# Altium schematic symbol library MM32F3277G9P.SCHLIB: 73 symbols
Pins are listed as number, name and electrical type; pins without a type are passive.

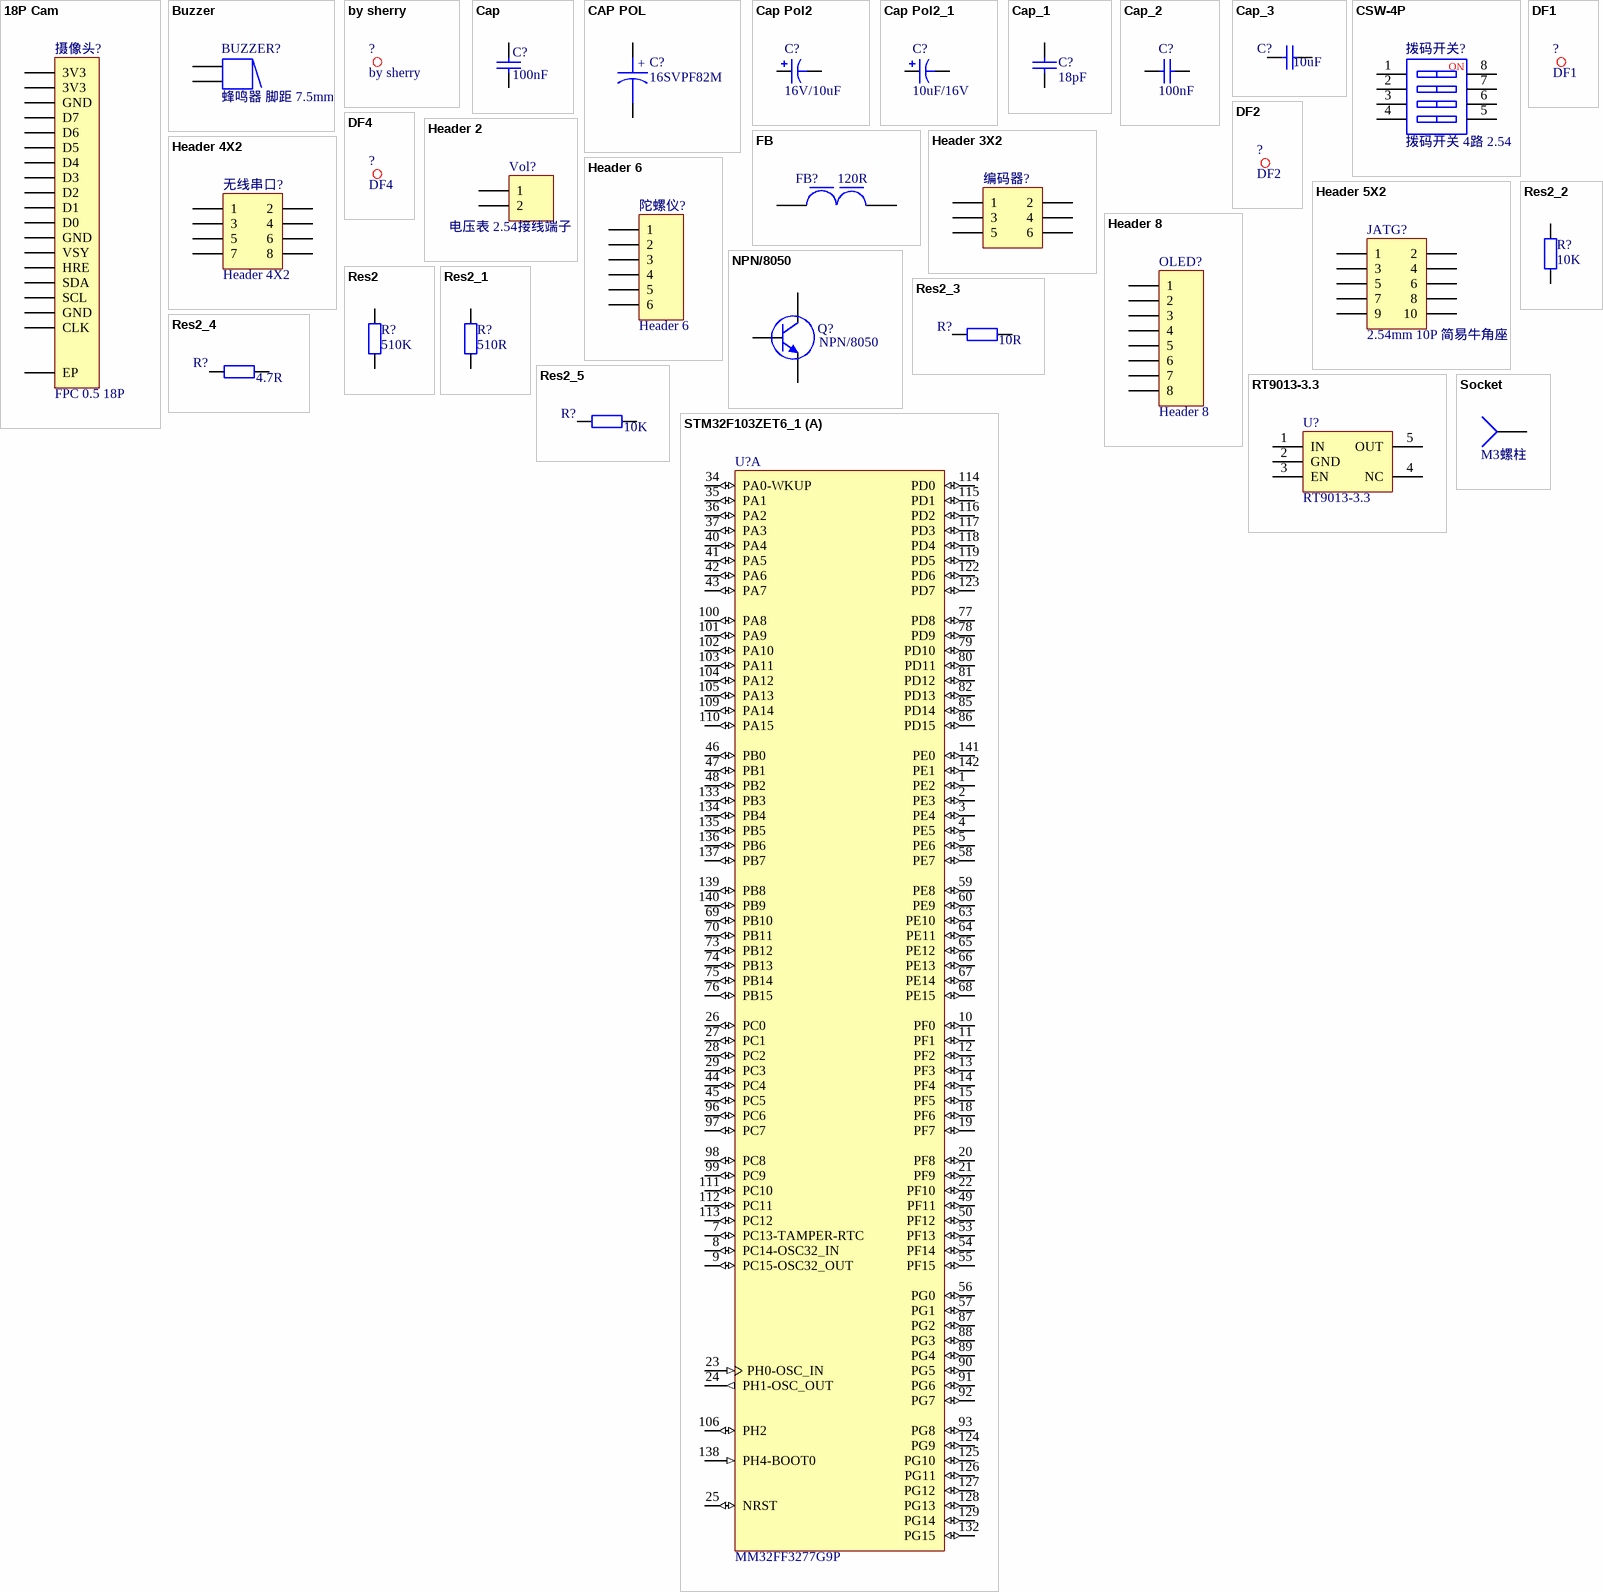
[diagram p0: symbols 18P Cam to STM32F103ZET6_1]

## 18P Cam
designator 摄像头?, comment FPC 0.5 18P
Header, 25-Pin; LatestRevisionDate: 17-Jul-2002; LatestRevisionNote: Re-released for DXP Platform.; Publisher: Altium Limited
signal-integrity model Connector
footprint FPC0.5 2H-WS-18P (长：13.2mm，宽：5.2mm，高：2mm)
pins: 0 EP, 1 3V3, 2 3V3, 3 GND, 4 D7, 5 D6, 6 D5, 7 D4, 8 D3, 9 D2, 10 D1, 11 D0, 12 GND, 13 VSY, 14 HRE, 15 SDA, 16 SCL, 17 GND, 18 CLK

## Buzzer
designator BUZZER?, comment 蜂鸣器 脚距 7.5mm
Magnetic Transducer Buzzer; Published: 24-Mar-1999; LatestRevisionDate: 17-Dec-2003; LatestRevisionNote: Schematic revised, PCB Footprint replaced.; DatasheetVersion: 17-Dec-2003; PackageReference: ABSM-1574; Publisher: Altium Limited; PackageDescription: Magnetic Transducer Buzzer; ComponentLink1Description: Manufacturer Link; ComponentLink1URL: http://www.megastar.com/linecard/buzzmode/index.php
footprint 7.5mm 蜂鸣器
footprint 蜂鸣器5.5mm脚距
pins: 1, 2
1 alternate drawing of the same symbol

## by sherry
designator ?
footprint IMPORTED_IMAGE

## Cap
designator C?, comment 100nF
Capacitor; Published: 8-Jun-2000; LatestRevisionDate: 17-Jul-2002; LatestRevisionNote: Re-released for DXP Platform.; PackageReference: RAD-0.3; Publisher: Altium Limited; PackageDescription: Radial Cap, Thru-Hole; 2 Leads; 0.3 in Pin Spacing
simulation model CAP (Capacitor)
signal-integrity model Cap
footprint 0603 电容 C3
pins: 1, 2

## CAP POL
designator C?, comment 16SVPF82M
Capacitor
footprint CT 8*7 - V (直径8mm，高7mm)
footprint CAP 5.0*12.5*20-H - GD (脚距5mm直径12.5mm高度20mm)
footprint CAP 3.5*8*11.5 - BK (脚距3.5mm直径8mm高度11.5mm)
footprint CAP 2.5*6.3*11.2 (脚距2.5mm直径6.3mm高度11.2mm)
pins: 1, 2
text: +

## Cap Pol2
designator C?, comment value 16V/10uF  (hidden comment: 10UF)
Polarized Capacitor (Axial); Published: 8-Jun-2000; LatestRevisionDate: 17-Jul-2002; LatestRevisionNote: Re-released for DXP Platform.; PackageReference: POLAR0.8; Publisher: Altium Limited; PackageDescription: Polarized Capacitor; 2 Leads
simulation model CAP (Capacitor)
signal-integrity model Cap Pol
footprint 0603 电容 C3
footprint C0805
pins: 1, 2
1 alternate drawing of the same symbol

## Cap Pol2_1
designator C?, comment 10UF  (value not drawn)
Polarized Capacitor (Axial); Published: 8-Jun-2000; LatestRevisionDate: 17-Jul-2002; LatestRevisionNote: Re-released for DXP Platform.; PackageReference: POLAR0.8; Publisher: Altium Limited; PackageDescription: Polarized Capacitor; 2 Leads
simulation model CAP (Capacitor)
signal-integrity model Cap Pol
footprint 0603 电容 C3
footprint C0805
pins: 1, 2
1 alternate drawing of the same symbol
text: 10uF/16V

## Cap_1
designator C?, comment 18pF
Capacitor; Published: 8-Jun-2000; LatestRevisionDate: 17-Jul-2002; LatestRevisionNote: Re-released for DXP Platform.; PackageReference: RAD-0.3; Publisher: Altium Limited; PackageDescription: Radial Cap, Thru-Hole; 2 Leads; 0.3 in Pin Spacing
simulation model CAP (Capacitor)
signal-integrity model Cap
footprint 0603 电容 C3
pins: 1, 2

## Cap_2
designator C?, comment 100nF
Capacitor; Published: 8-Jun-2000; LatestRevisionDate: 17-Jul-2002; LatestRevisionNote: Re-released for DXP Platform.; PackageReference: RAD-0.3; Publisher: Altium Limited; PackageDescription: Radial Cap, Thru-Hole; 2 Leads; 0.3 in Pin Spacing
simulation model CAP (Capacitor)
signal-integrity model Cap
footprint 0603 电容 C3
pins: 1, 2

## Cap_3
designator C?, comment 10UF
Capacitor; Published: 8-Jun-2000; LatestRevisionDate: 17-Jul-2002; LatestRevisionNote: Re-released for DXP Platform.; PackageReference: RAD-0.3; Publisher: Altium Limited; PackageDescription: Radial Cap, Thru-Hole; 2 Leads; 0.3 in Pin Spacing; Value: 10uF
simulation model CAP (Capacitor)
signal-integrity model Cap
footprint 0603 电容 C3
pins: 1, 2

## CSW-4P
designator 拨码开关?, comment 拨码开关 4路 2.54
4路编码开关; 版权归属: 源创客; BOM名称: 4路编码开关; 学习资源: www.ooocke.com
footprint CSW DIP-2P_G (6.6*9.9*7mm)
pins: 1, 2, 3, 4, 5, 6, 7, 8
text: NO

## DF1
designator ?
footprint DF1
footprint DF1

## DF2
designator ?
footprint DF2

## DF4
designator ?
footprint DF4小
footprint DF4大

## FB
designator FB?, comment 120R
footprint 0805 磁珠 FB3
pins: 1, 2

## Header 2
designator Vol?, comment 电压表 2.54接线端子
Header, 2-Pin; LatestRevisionDate: 17-Jul-2002; LatestRevisionNote: Re-released for DXP Platform.; Publisher: Altium Limited
signal-integrity model Connector
footprint XH2.54-LI-2P (接插件，2P)
pins: 1, 2

## Header 3X2
designator 编码器?  (value not drawn)
Header, 3-Pin, Dual row; LatestRevisionDate: 17-Jul-2002; LatestRevisionNote: Re-released for DXP Platform.; Publisher: Altium Limited
signal-integrity model Connector
footprint 2.54mm 6P 简易牛角座 (立式直插简牛插座，间距2.54（蒜米工坊）)
footprint DC-2.54-L-Z-6P (立式直插简牛插座，间距2.54（蒜米工坊）)
pins: 1, 2, 3, 4, 5, 6

## Header 4X2
designator 无线串口?
Header, 4-Pin, Dual row; LatestRevisionDate: 17-Jul-2002; LatestRevisionNote: Re-released for DXP Platform.; Publisher: Altium Limited
signal-integrity model Connector
footprint HDR2.54-LI-2x4P (双排排针，4x2脚)
pins: 1, 2, 3, 4, 5, 6, 7, 8

## Header 5X2
designator JATG?, comment 2.54mm 10P 简易牛角座
Header, 5-Pin, Dual row
footprint HDR2.54-LI-2x5P (双排排针，5x2脚 淘宝ID:黄晶宝石   店铺网址:https://shop463601444.taobao.com)
pins: 1, 2, 3, 4, 5, 6, 7, 8, 9, 10

## Header 6
designator 陀螺仪?
Header, 6-Pin; LatestRevisionDate: 17-Jul-2002; LatestRevisionNote: Re-released for DXP Platform.; Publisher: Altium Limited
signal-integrity model Connector
footprint MX 1.25-WS-6P (长：12.65mm，宽：4.2mm，高：3.4mm)
pins: 1, 2, 3, 4, 5, 6

## Header 8
designator OLED?
Header, 8-Pin; LatestRevisionDate: 17-Jul-2002; LatestRevisionNote: Re-released for DXP Platform.; Publisher: Altium Limited
signal-integrity model Connector
footprint HDR2.54-LI-8P (排针，8脚)
pins: 1, 2, 3, 4, 5, 6, 7, 8

## NPN/8050
designator Q?
footprint SOT232-3 三极管
footprint 蜂鸣器 (淘宝ID:黄晶宝石)
pins: 1 B, 2 E, 3 C

## Res2
designator R?, comment 510K
Resistor; Value: 1.5K; Published: 8-Jun-2000; LatestRevisionDate: 17-Jul-2002; LatestRevisionNote: Re-released for DXP Platform.; PackageReference: AXIAL-0.4; Publisher: Altium Limited; PackageDescription: Axial Device, Thru-Hole; 2 Leads; 0.4 in Pin Spacing
simulation model RESISTOR (Resistor)
signal-integrity model Res
footprint 0603 电阻 R3
pins: 1, 2

## Res2_1
designator R?, comment 510R
Resistor; Value: 1.5K; Published: 8-Jun-2000; LatestRevisionDate: 17-Jul-2002; LatestRevisionNote: Re-released for DXP Platform.; PackageReference: AXIAL-0.4; Publisher: Altium Limited; PackageDescription: Axial Device, Thru-Hole; 2 Leads; 0.4 in Pin Spacing
simulation model RESISTOR (Resistor)
signal-integrity model Res
footprint 0603 电阻 R3
pins: 1, 2

## Res2_2
designator R?, comment 10K
Resistor; Value: 1.5K; Published: 8-Jun-2000; LatestRevisionDate: 17-Jul-2002; LatestRevisionNote: Re-released for DXP Platform.; PackageReference: AXIAL-0.4; Publisher: Altium Limited; PackageDescription: Axial Device, Thru-Hole; 2 Leads; 0.4 in Pin Spacing
simulation model RESISTOR (Resistor)
signal-integrity model Res
footprint 0603 电阻 R3
pins: 1, 2

## Res2_3
designator R?, comment value 10R  (hidden comment: 4.7K)
Resistor; Published: 8-Jun-2000; LatestRevisionDate: 17-Jul-2002; LatestRevisionNote: Re-released for DXP Platform.; PackageReference: AXIAL-0.4; Publisher: Altium Limited; PackageDescription: Axial Device, Thru-Hole; 2 Leads; 0.4 in Pin Spacing
simulation model RESISTOR (Resistor)
signal-integrity model Res
footprint 0603 电阻 R3
pins: 1, 2

## Res2_4
designator R?, comment value 4.7R  (hidden comment: 4.7K)
Resistor; Published: 8-Jun-2000; LatestRevisionDate: 17-Jul-2002; LatestRevisionNote: Re-released for DXP Platform.; PackageReference: AXIAL-0.4; Publisher: Altium Limited; PackageDescription: Axial Device, Thru-Hole; 2 Leads; 0.4 in Pin Spacing
simulation model RESISTOR (Resistor)
signal-integrity model Res
footprint 0603 电阻 R3
pins: 1, 2

## Res2_5
designator R?, comment value 10K  (hidden comment: 4.7K)
Resistor; Published: 8-Jun-2000; LatestRevisionDate: 17-Jul-2002; LatestRevisionNote: Re-released for DXP Platform.; PackageReference: AXIAL-0.4; Publisher: Altium Limited; PackageDescription: Axial Device, Thru-Hole; 2 Leads; 0.4 in Pin Spacing
simulation model RESISTOR (Resistor)
signal-integrity model Res
footprint 0603 电阻 R3
pins: 1, 2

## RT9013-3.3
designator U?
3.3V电源芯片
footprint SOT23-5N (3x1.6x1.1mm(长宽高))
pins: 1 IN, 2 GND, 3 EN, 4 NC, 5 OUT

## Socket
designator J?, comment M3螺柱
Socket; LatestRevisionDate: 17-Jul-2002; LatestRevisionNote: Re-released for DXP Platform.; Publisher: Altium Limited
signal-integrity model Connector
footprint MTGP720H320V6P - duplicate
pins: 1

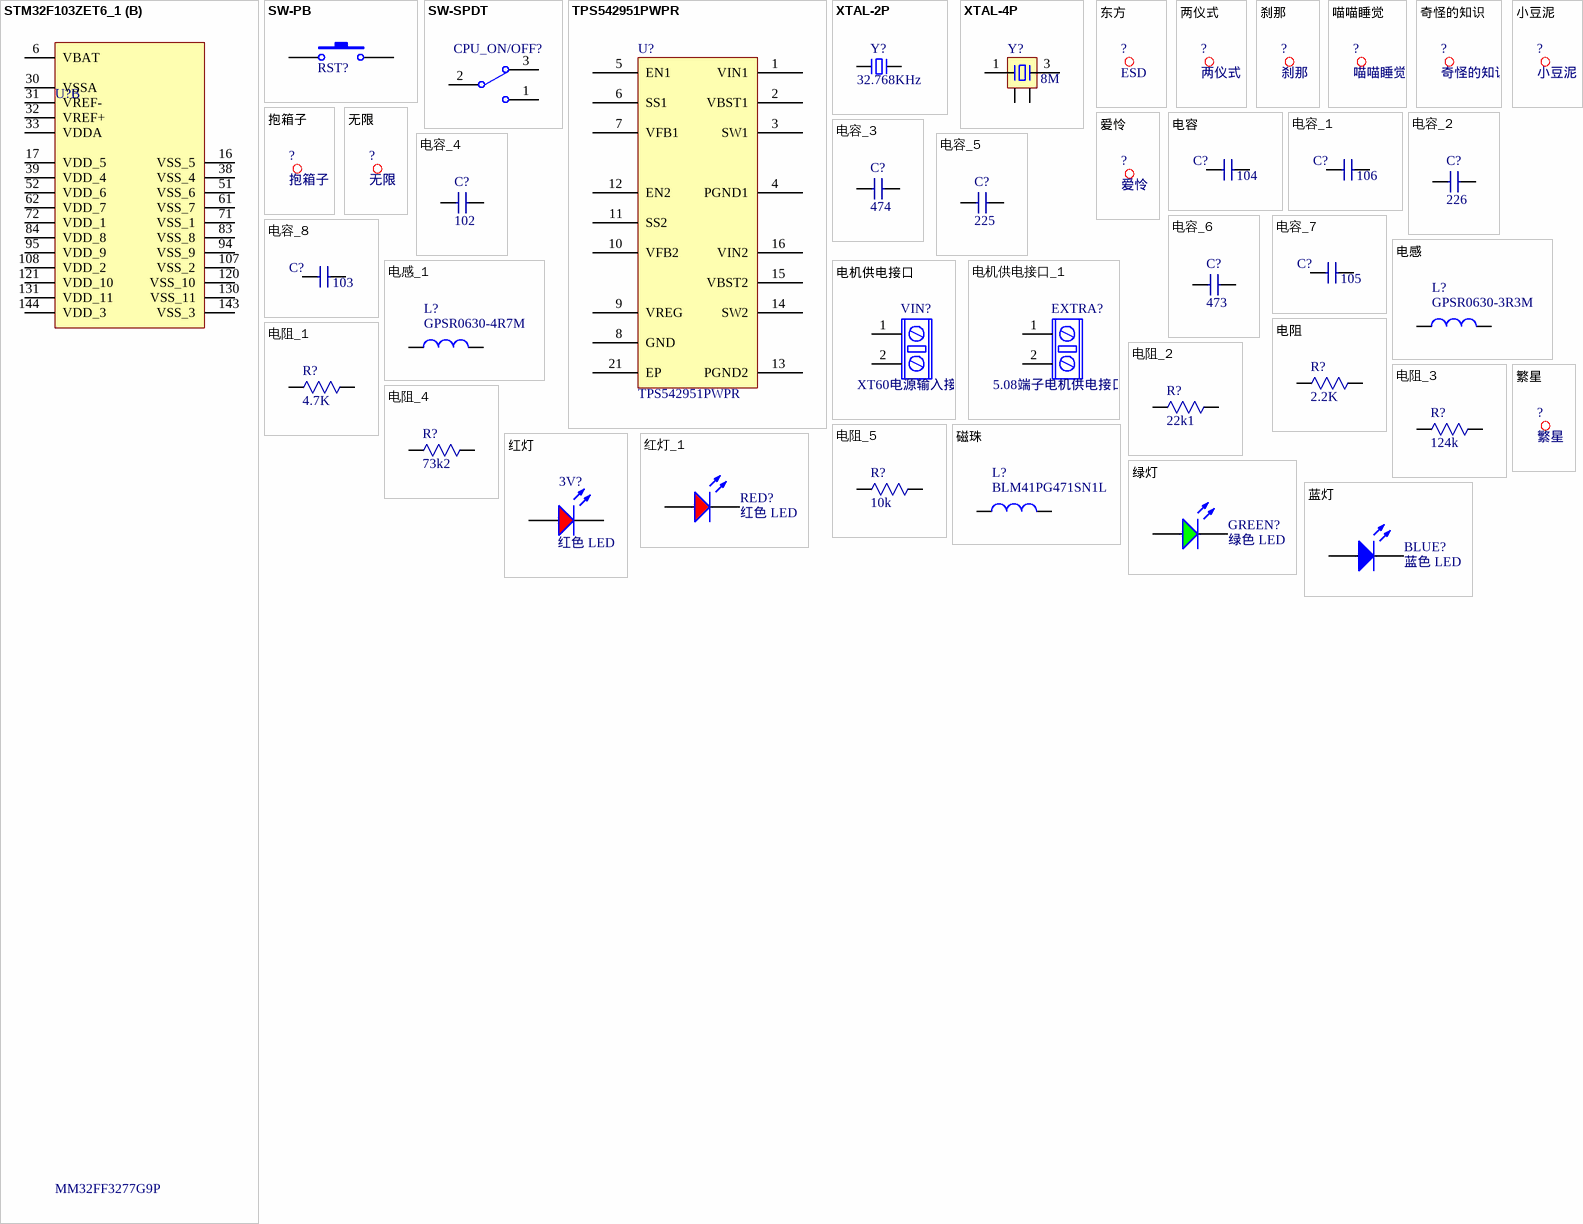
[diagram p1: symbols STM32F103ZET6_1 to 蓝灯]

## STM32F103ZET6_1
designator U?, comment MM32FF3277G9P
STM32 ARM-based 32-bit MCU Performance Line with 512 kB Flash, 64 kB Internal RAM, -40 to +85癈 Temperature, 144-Pin LQFP, Tray; DatasheetVersion: rev8.0, Apr-2011; PackageVersion: 2011; PackageReference: LQFP144; PackageDescription: 144-Pin Thin Quad Flat Pack 0.5 mm Pitch; ComponentLink1Description: Manufacturer URL; ComponentLink1URL: http://www.st.com/; ComponentLink2Description: STM32F103 Datasheet; ComponentLink2URL: http://www.st.com/internet/com/TECHNICAL_RESOURCES/TECHNICAL_LITERATURE/DATASHEET/CD00191185.pdf; ComponentLink3Description: STM32 Family Web Page; ComponentLink3URL: www.st.com/stm32
footprint LQFP-144_L20.0-W20.0-P0.50-LS22.0-BL
part A pins: 1 PE2 (io), 2 PE3 (io), 3 PE4 (io), 4 PE5 (io), 5 PE6 (io), 7 PC13-TAMPER-RTC (io), 8 PC14-OSC32_IN (io), 9 PC15-OSC32_OUT (io), 10 PF0 (io), 11 PF1 (io), 12 PF2 (io), 13 PF3 (io), 14 PF4 (io), 15 PF5 (io), 18 PF6 (io), 19 PF7 (io), 20 PF8 (io), 21 PF9 (io), 22 PF10 (io), 23 PH0-OSC_IN (in), 24 PH1-OSC_OUT (out), 25 NRST (io), 26 PC0 (io), 27 PC1 (io), 28 PC2 (io), 29 PC3 (io), 34 PA0-WKUP (io), 35 PA1 (io), 36 PA2 (io), 37 PA3 (io), 40 PA4 (io), 41 PA5 (io), 42 PA6 (io), 43 PA7 (io), 44 PC4 (io), 45 PC5 (io), 46 PB0 (io), 47 PB1 (io), 48 PB2 (io), 49 PF11 (io), 50 PF12 (io), 53 PF13 (io), 54 PF14 (io), 55 PF15 (io), 56 PG0 (io), 57 PG1 (io), 58 PE7 (io), 59 PE8 (io), 60 PE9 (io), 63 PE10 (io), 64 PE11 (io), 65 PE12 (io), 66 PE13 (io), 67 PE14 (io), 68 PE15 (io), 69 PB10 (io), 70 PB11 (io), 73 PB12 (io), 74 PB13 (io), 75 PB14 (io), 76 PB15 (io), 77 PD8 (io), 78 PD9 (io), 79 PD10 (io), 80 PD11 (io), 81 PD12 (io), 82 PD13 (io), 85 PD14 (io), 86 PD15 (io), 87 PG2 (io), 88 PG3 (io), 89 PG4 (io), 90 PG5 (io), 91 PG6 (io), 92 PG7 (io), 93 PG8 (io), 96 PC6 (io), 97 PC7 (io), 98 PC8 (io), 99 PC9 (io), 100 PA8 (io), 101 PA9 (io), 102 PA10 (io), 103 PA11 (io), 104 PA12 (io), 105 PA13 (io), 106 PH2 (io), 109 PA14 (io), 110 PA15 (io), 111 PC10 (io), 112 PC11 (io), 113 PC12 (io), 114 PD0 (io), 115 PD1 (io), 116 PD2 (io), 117 PD3 (io), 118 PD4 (io), 119 PD5 (io), 122 PD6 (io), 123 PD7 (io), 124 PG9 (io), 125 PG10 (io), 126 PG11 (io), 127 PG12 (io), 128 PG13 (io), 129 PG14 (io), 132 PG15 (io), 133 PB3 (io), 134 PB4 (io), 135 PB5 (io), 136 PB6 (io), 137 PB7 (io), 138 PH4-BOOT0 (in), 139 PB8 (io), 140 PB9 (io), 141 PE0 (io), 142 PE1 (io)
part B pins: 6 VBAT (power), 16 VSS_5 (power), 17 VDD_5 (power), 30 VSSA (power), 31 VREF- (power), 32 VREF+ (power), 33 VDDA (power), 38 VSS_4 (power), 39 VDD_4 (power), 51 VSS_6 (power), 52 VDD_6 (power), 61 VSS_7 (power), 62 VDD_7 (power), 71 VSS_1 (power), 72 VDD_1 (power), 83 VSS_8 (power), 84 VDD_8 (power), 94 VSS_9 (power), 95 VDD_9 (power), 107 VSS_2 (power), 108 VDD_2 (power), 120 VSS_10 (power), 121 VDD_10 (power), 130 VSS_11 (power), 131 VDD_11 (power), 143 VSS_3 (power), 144 VDD_3 (power)

## SW-PB
designator RST?  (value not drawn)
Switch; Published: 24-Mar-1999; LatestRevisionDate: 17-Jul-2002; LatestRevisionNote: Re-released for DXP Platform.; PackageReference: SPST-2; Publisher: Altium Limited; PackageDescription: Switch; 2 Leads
footprint TSW SMD-3*6*2.5 (3*6*2.5mm)
pins: 1, 2

## SW-SPDT
designator CPU_ON/OFF?  (value not drawn)
SPDT Subminiature Toggle Switch, Right Angle Mounting, Vertical Actuation; Published: 24-Mar-1999; LatestRevisionDate: 17-Dec-2003; LatestRevisionNote: Schematic revised, PCB Footprint replaced.; DatasheetVersion: 05-Dec-2000; PackageReference: TL36WW15050; Publisher: Altium Limited; PackageDescription: Switch; 4 Leads; ComponentLink1Description: Manufacturer Link; ComponentLink1URL: http://www.apem.com
footprint MTS-102S 两档纽子开关 (MTS10系列3脚扭子开关)
pins: 1, 2, 3

## TPS542951PWPR
designator U?
footprint SSOP16_EP (6.3*7.7*1.6mm（长宽高）)
pins: 1 VIN1, 2 VBST1, 3 SW1, 4 PGND1, 5 EN1, 6 SS1, 7 VFB1, 8 GND, 9 VREG, 10 VFB2, 11 SS2, 12 EN2, 13 PGND2, 14 SW2, 15 VBST2, 16 VIN2, 21 EP

## XTAL-2P
designator Y?, comment 32.768KHz
2脚无源脚晶振; 版权归属: 封装库来自淘宝卖家 ID：黄晶宝石; BOM名称: 2脚无源脚晶振; 学习资源: https://shop463601444.taobao.com
footprint OSC-SMD_2P-L3.2-W1.5
footprint OSC 455E-LI (3.6mm*7mm*9mm(长*宽*高)  脚距5mm)
footprint OSC 455E-WI (3.6mm*7mm*9mm(长*宽*高)  脚距5mm)
footprint OSC 3215-2P (3.2*1.5*0.6mm(长宽高))
footprint OSC 5032-2P (5mm*3.2mm*0.8mm(长*宽*高))
footprint OSC 6035-2P (6mm*3.5mm*1mm(长*宽*高))
footprint OSC 7050-2P (7mm*5mm*1.3mm(长*宽*高))
footprint OSC 8045-2P (8mm*4.5mm*1.8mm(长*宽*高))
footprint OSC-2x6-LI (脚距：1.6mm)
footprint OSC-2x6-WI-A (脚距：1.6mm)
footprint OSC-2x6-WI-B (脚距：1.6mm)
footprint OSC-2x6-WS (脚距：1.6mm)
footprint OSC-3x8-LI (脚距：2mm)
footprint OSC-3x8-WI-A (脚距：2mm)
footprint OSC-3x8-WI-B (脚距：2mm)
footprint OSC-3x8-WS (脚距：2mm)
footprint OSC-3x10-LI (脚距：2mm)
footprint OSC-3x10-WI-A (脚距：2mm)
footprint OSC-3x10-WI-B (脚距：2mm)
footprint OSC-3x10-WS (脚距：2mm)
footprint OSC HC-49SMD
footprint OSC HC-49U
footprint OSC UM-1
footprint OSC UM-5
footprint OSC-SMD_2P-L3.2-W1.5
footprint OSC-SMD_2P-L3.2-W1.5
pins: 1, 2

## XTAL-4P
designator Y?, comment 8M
4脚无源晶振; 版权归属: 源创客; BOM名称: 4脚无源晶振; 学习资源: www.ooocke.com
footprint OSC 2025-4P (2*2.5*0.55mm(长宽高)     淘宝ID:黄晶宝石)
footprint CRYSTAL-SMD_4P-L3.2-W2.5-BL
footprint CRYSTAL-SMD_4P-L3.2-W2.5-BL
footprint SW-SMD_ST-1188U
pins: 1, 2, 3, 4

## 东方
designator ?, comment ESD
footprint IMPORTED_IMAGE - duplicate18
footprint ESD

## 两仪式
designator ?
footprint 两仪式
footprint 两仪式

## 刹那
designator ?
footprint 刹那

## 喵喵睡觉
designator ?
footprint 喵喵睡觉

## 奇怪的知识
designator ?
footprint 奇怪的知识
footprint 奇怪的知识

## 小豆泥
designator ?
footprint 小豆泥

## 抱箱子
designator ?
footprint 抱箱子_大
footprint 抱箱子_小

## 无限
designator ?
footprint 无限

## 爱怜
designator ?
footprint 爱怜

## 电容
designator C?, comment 104
footprint C0402
footprint C0603
footprint C0805
footprint C1206
footprint C1210
footprint C1812 (无极性贴片电容)
footprint C2220 (无极性贴片电容)
pins: 1, 2

## 电容_1
designator C?, comment 106
footprint C0402
footprint C0603
footprint C0805
footprint C1206
footprint C1210
footprint C1812 (无极性贴片电容)
footprint C2220 (无极性贴片电容)
pins: 1, 2

## 电容_2
designator C?, comment 226
footprint C0402
footprint C0603
footprint C0805
footprint C1206
footprint C1210
footprint C1812 (无极性贴片电容)
footprint C2220 (无极性贴片电容)
pins: 1, 2

## 电容_3
designator C?, comment 474
footprint C0402
footprint C0603
footprint C0805
footprint C1206
footprint C1210
footprint C1812 (无极性贴片电容)
footprint C2220 (无极性贴片电容)
pins: 1, 2

## 电容_4
designator C?, comment 102
footprint C0402
footprint C0603
footprint C0805
footprint C1206
footprint C1210
footprint C1812 (无极性贴片电容)
footprint C2220 (无极性贴片电容)
pins: 1, 2

## 电容_5
designator C?, comment 225
footprint C0402
footprint C0603
footprint C0805
footprint C1206
footprint C1210
footprint C1812 (无极性贴片电容)
footprint C2220 (无极性贴片电容)
pins: 1, 2

## 电容_6
designator C?, comment 473
footprint C0402
footprint C0603
footprint C0805
footprint C1206
footprint C1210
footprint C1812 (无极性贴片电容)
footprint C2220 (无极性贴片电容)
pins: 1, 2

## 电容_7
designator C?, comment 105
footprint C0402
footprint C0603
footprint C0805
footprint C1206
footprint C1210
footprint C1812 (无极性贴片电容)
footprint C2220 (无极性贴片电容)
pins: 1, 2

## 电容_8
designator C?, comment 103
footprint C0402
footprint C0603
footprint C0805
footprint C1206
footprint C1210
footprint C1812 (无极性贴片电容)
footprint C2220 (无极性贴片电容)
pins: 1, 2

## 电感
designator L?, comment GPSR0630-3R3M
footprint L 0402 (小功率贴片电感)
footprint L 0603 (小功率贴片电感)
footprint L 0805 (小功率贴片电感)
footprint CDRH127 (12*12*8mm（长宽高）)
footprint SWPA4030S (轮廓4mm*4mm ，焊盘间距1.9mm（蒜米工坊）)
footprint CD54 (5.8*5.2*4.5mm（长宽高）)
footprint L 0630 (6.6mm*7.2mm*3mm)
pins: 1, 2

## 电感_1
designator L?, comment GPSR0630-4R7M
footprint L 0402 (小功率贴片电感)
footprint L 0603 (小功率贴片电感)
footprint L 0805 (小功率贴片电感)
footprint CDRH127 (12*12*8mm（长宽高）)
footprint SWPA4030S (轮廓4mm*4mm ，焊盘间距1.9mm（蒜米工坊）)
footprint CD54 (5.8*5.2*4.5mm（长宽高）)
footprint L 0630 (6.6mm*7.2mm*3mm)
pins: 1, 2

## 电机供电接口
designator VIN?, comment XT60电源输入接口
footprint XT60 母头 电源接口
pins: 1, 2

## 电机供电接口_1
designator EXTRA?, comment 5.08端子电机供电接口
footprint 5.08 螺钉式 2p (Terminal Block, 10A 160V, Pitch 3.5mm, 2 Positions, Screw Connection)
pins: 1, 2

## 电阻
designator R?, comment 2.2K
footprint R0402
footprint R0603
footprint R0805
footprint R1206
footprint R1210
footprint R1812
footprint R2512 (1W贴片电阻)
footprint 3920_105 锰铜分流器 (SMD, 2-Leads, Body 10x5.2mm)
pins: 1, 2

## 电阻_1
designator R?, comment 4.7K
footprint R0402
footprint R0603
footprint R0805
footprint R1206
footprint R1210
footprint R1812
footprint R2512 (1W贴片电阻)
footprint 3920_105 锰铜分流器 (SMD, 2-Leads, Body 10x5.2mm)
pins: 1, 2

## 电阻_2
designator R?, comment 22k1
footprint R0402
footprint R0603
footprint R0805
footprint R1206
footprint R1210
footprint R1812
footprint R2512 (1W贴片电阻)
footprint 3920_105 锰铜分流器 (SMD, 2-Leads, Body 10x5.2mm)
pins: 1, 2

## 电阻_3
designator R?, comment 124k
footprint R0402
footprint R0603
footprint R0805
footprint R1206
footprint R1210
footprint R1812
footprint R2512 (1W贴片电阻)
footprint 3920_105 锰铜分流器 (SMD, 2-Leads, Body 10x5.2mm)
pins: 1, 2

## 电阻_4
designator R?, comment 73k2
footprint R0402
footprint R0603
footprint R0805
footprint R1206
footprint R1210
footprint R1812
footprint R2512 (1W贴片电阻)
footprint 3920_105 锰铜分流器 (SMD, 2-Leads, Body 10x5.2mm)
pins: 1, 2

## 电阻_5
designator R?, comment 10k
footprint R0402
footprint R0603
footprint R0805
footprint R1206
footprint R1210
footprint R1812
footprint R2512 (1W贴片电阻)
footprint 3920_105 锰铜分流器 (SMD, 2-Leads, Body 10x5.2mm)
pins: 1, 2

## 磁珠
designator L?, comment BLM41PG471SN1L
BLM18PG471SN1D
footprint FB0603
footprint FB0805
footprint R1206
pins: 1, 2

## 繁星
designator ?
footprint 繁星

## 红灯
designator 3V?, comment 红色 LED
发光二极管; ComponentLink1Description: 供应商链接; ComponentLink1URL: http://www.szlcsc.com/product/details_2668.html; Package: 0805; Supplier: LC; SuppliersPartNumber: C2295
footprint 0603 LED R
footprint 0402-LEDR
pins: 1, 2

## 红灯_1
designator RED?, comment 红色 LED
发光二极管; ComponentLink1Description: 供应商链接; ComponentLink1URL: http://www.szlcsc.com/product/details_2668.html; Package: 0805; Supplier: LC; SuppliersPartNumber: C2295
footprint 0603 LED R
footprint 0402-LEDR
pins: 1, 2

## 绿灯
designator GREEN?, comment 绿色 LED
发光二极管; ComponentLink1Description: 供应商链接; ComponentLink1URL: http://www.szlcsc.com/product/details_2670.html; Package: 0805; Supplier: LC; SuppliersPartNumber: C2297
footprint 0402-LEDG
footprint 0603 LED G (Kingbright,1608,LED,400 mcd 120*)
pins: 1, 2

## 蓝灯
designator BLUE?, comment 蓝色 LED
发光二极管; ComponentLink1Description: 供应商链接; ComponentLink1URL: http://www.szlcsc.com/product/details_2666.html; Package: 0805; Supplier: LC; SuppliersPartNumber: C2293
footprint 0402-LEDB
footprint 0603 LED B
pins: 1, 2

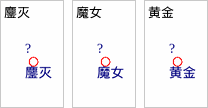
[diagram p2: symbols 鏖灭 to 黄金]

## 鏖灭
designator ?
footprint 鏖灭

## 魔女
designator ?
footprint 魔女小

## 黄金
designator ?
footprint 黄金